# Altium integrated library Integrated_Circuts.IntLib: 31 symbols (part 1 of 2)
Pins are listed as number, name and electrical type; pins without a type are passive.

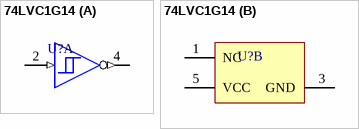
[diagram p0: symbol 74LVC1G14]

## 74LVC1G14
designator U?  (value not drawn)
footprint SOT23-5_L
footprint SOT23-5_M
footprint SOT23-5_N
part A pins: 2 A (in) "Input A", 4 Y (out) "Output Y"
part B pins: 1 NC "Ground", 3 GND (power) "Ground Pin", 5 VCC (power) "Power Pin"


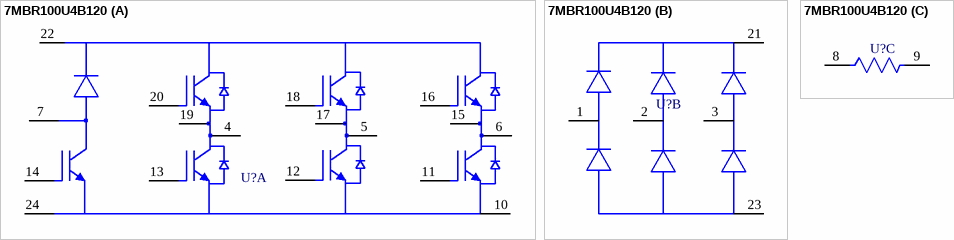
[diagram p1: symbol 7MBR100U4B120]

## 7MBR100U4B120
designator U?  (value not drawn)
footprint 7MBR100U4B120
part A pins: 4 U, 5 V, 6 W, 7 B, 10 En, 11 Gz, 12 Gy, 13 Gx, 14 Gb, 15 Ew, 16 Gw, 17 Ev, 18 Gv, 19 Eu, 20 Gu, 22 P1, 24 N1
part B pins: 1 R, 2 S, 3 T, 21 P, 23 N
part C pins: 8, 9


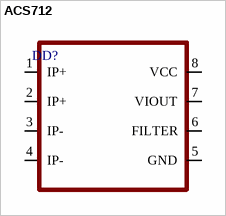
[diagram p2: symbol ACS712]

## ACS712
designator DD?
footprint SO8-150
pins: 1 IP+, 2 IP+, 3 IP-, 4 IP-, 5 GND, 6 FILTER, 7 VIOUT, 8 VCC


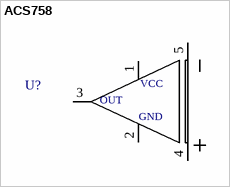
[diagram p3: symbol ACS758]

## ACS758
designator U?  (value not drawn)
footprint ACS758-100
pins: 1 +VCC, 2 GND, 3 OUT, 4 +IP, 5 -IP
text: VCC


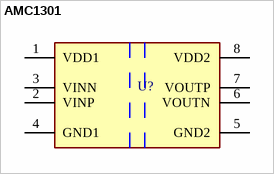
[diagram p4: symbol AMC1301]

## AMC1301
designator U?  (value not drawn)
footprint FP-DWV0008A-IPC_A
footprint FP-DWV0008A-IPC_B
footprint FP-DWV0008A-IPC_C
footprint FP-DWV0008A-MFG
pins: 1 VDD1 (power), 2 VINP (hiz), 3 VINN (hiz), 4 GND1 (power), 5 GND2 (power), 6 VOUTN, 7 VOUTP, 8 VDD2 (power)


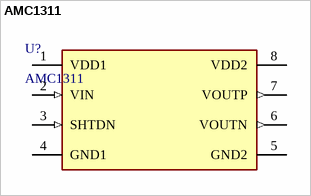
[diagram p5: symbol AMC1311]

## AMC1311
designator U?
footprint FP-DWV0008A-MFG
footprint FP-DWV0008A-IPC_C
footprint FP-DWV0008A-IPC_B
footprint FP-DWV0008A-IPC_A
pins: 1 VDD1 (power), 2 VIN (in), 3 SHTDN (in), 4 GND1 (power), 5 GND2 (power), 6 VOUTN (out), 7 VOUTP (out), 8 VDD2 (power)


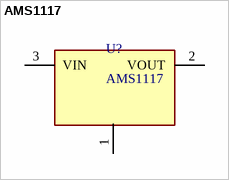
[diagram p6: symbol AMS1117]

## AMS1117
designator U?
footprint SOT-223-3
footprint SOT-223
footprint SOT-89
pins: 1 Ground (power), 2 VOUT, 3 VIN (power)


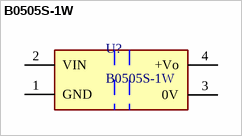
[diagram p7: symbol B0505S-1W]

## B0505S-1W
designator U?
footprint B0505S-1W
pins: 1 GND (power), 2 VIN (power), 3 0V (power), 4 +Vo (power)


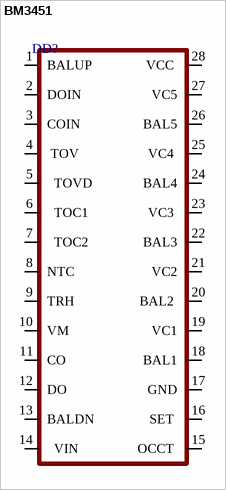
[diagram p8: symbol BM3451]

## BM3451
designator DD?
footprint TSSOP-28
pins: 1 BALUP, 2 DOIN, 3 COIN , 4  TOV, 5   TOVD, 6   TOC1, 7   TOC2, 8 NTC, 9 TRH, 10 VM, 11 CO , 12 DO, 13 BALDN, 14   VIN, 15 OCCT , 16 SET , 17 GND, 18 BAL1, 19 VC1, 20 BAL2 , 21 VC2, 22 BAL3, 23 VC3 , 24 BAL4, 25 VC4 , 26 BAL5, 27 VC5, 28 VCC 


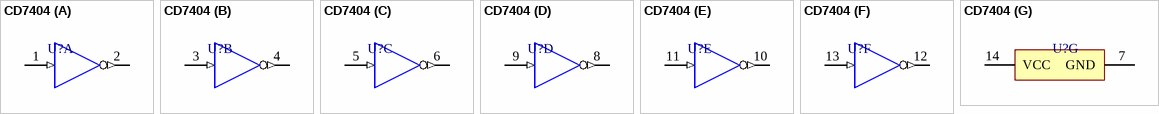
[diagram p9: symbol CD7404]

## CD7404
designator U?  (value not drawn)
footprint D0014A_L
footprint D0014A_N
footprint D0014A_M
part A pins: 1 1A (in) "Input 1A", 2 ~{1Y} (out) "Output 1Y"
part B pins: 3 2A (in) "Input 2A", 4 ~{2Y} (out) "Output 2Y"
part C pins: 5 3A (in) "Input 3A", 6 ~{3Y} (out) "Output 3Y"
part D pins: 8 ~{4Y} (out) "Output 4Y", 9 4A (in) "Input 4A"
part E pins: 10 ~{5Y} (out) "Output 5Y", 11 5A (in) "Input 5A"
part F pins: 12 ~{6Y} (out) "Output 6Y", 13 6A (in) "Input 6A"
part G pins: 7 GND (power) "Ground Pin", 14 VCC (power) "Power Pin"


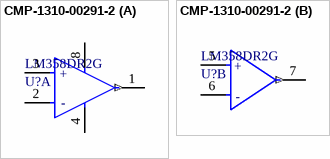
[diagram p10: symbol CMP-1310-00291-2]

## CMP-1310-00291-2
designator U?, comment LM358DR2G
IC OPAMP GP 2 CIRCUIT 8SOIC; Gain Bandwidth Product: 1MHz; Number of Circuits: 2; Min Supply Voltage: 3V; Slew Rate: 0.6V/µs; Max Dual Supply Voltage: 16V; Common Mode Rejection Ratio: 65dB; Input Bias Current: 250nA; Min Dual Supply Voltage: 1.5V; Dual Supply Voltage: 9V; Operating Supply Current: 1.5mA; Output Current: 40mA; Input Offset Voltage (Vos): 7mV; Nominal Supply Current: 1.2mA; Voltage Gain: 100dB; Max Supply Voltage: 32V; Width: 4mm; Number of Pins: 8; Min Operating Temperature: 0°C; REACH SVHC: No SVHC; Contact Plating: Tin; Lead Free: Lead Free; Halogen Free: Halogen Free; Power Supply Rejection Ratio (PSRR): 65dB; Operating Supply Voltage: 16V; Package Quantity: 2500; Max Operating Temperature: 70°C; Case/Package: SOIC; Height: 1.5mm; Packaging: Tape and Reel; Radiation Hardening: No; Number of Channels: 2; Bandwidth: 1MHz; Length: 5mm; Number of Elements: 2; Number of Amplifiers: 2; Output Current per Channel: 40mA
footprint FP-751-07-IPC_B
footprint FP-751-07-IPC_C
footprint FP-751-07-IPC_A
footprint FP-751-07-MFG
part A pins: 1 OUTPUT A (out), 2 INPUT A- (hiz), 3 INPUT A+ (hiz), 4 VEE/GND (power), 8 VCC (power)
part B pins: 5 INPUT B+ (hiz), 6 INPUT B- (hiz), 7 OUTPUT B (out)
part A text: +; -
part B text: +; -


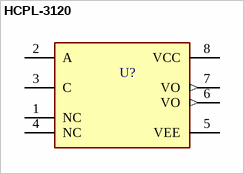
[diagram p11: symbol HCPL-3120]

## HCPL-3120
designator U?  (value not drawn)
footprint HCPL-3120
pins: 1 NC, 2 A, 3 C, 4 NC, 5 VEE (power), 6 VO (out), 7 VO (out), 8 VCC (power)


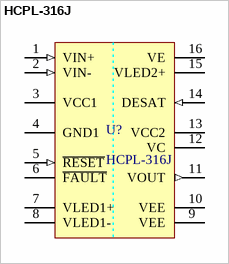
[diagram p12: symbol HCPL-316J]

## HCPL-316J
designator U?
footprint SOIC127P1036X391-16N
pins: 1 VIN+ (in) "Noninverting gate drive voltage output (VOUT) control input.", 2 VIN- (in) "Inverting gate drive voltage output(VOUT) control input.", 3 VCC1 (power) "Positive input supply voltage. (4.5 V to 5.5 V)", 4 GND1 (power) "Input Ground", 5 ~{RESET} (in) "F\A\U\L\T\ reset input.", 6 ~{FAULT} (hiz) "Fault output", 7 VLED1+ "LED 1 anode.", 8 VLED1- "LED 1 cathode.", 9 VEE (power) "Output supply voltage.", 10 VEE (power) "Output supply voltage.", 11 VOUT (out) "Gate drive voltage output.", 12 VC (power) "Collector of output pull-up triple-darlington 0.1 us, asynchronously resets FAULT output high transistor", 13 VCC2 (power) "Positive output supply voltage", 14 DESAT (in) "Desaturation voltage input.", 15 VLED2+ "LED 2 anode.", 16 VE (power) "Common (IGBT emitter) output supply voltage."


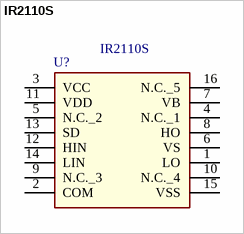
[diagram p13: symbol IR2110S]

## IR2110S
designator U?
IC DRIVER HIGH/LOW SIDE 16-SOIC; Manufacturer_Name: Infineon; Geometry.Height: 2.65mm; Manufacturer_Part_Number: IR2110S; Mouser Part Number: *; Mouser Price/Stock: *; Arrow Part Number: *; Arrow Price/Stock: *; Datasheet Link: https://www.infineon.com/dgdl/ir2110.pdf?fileId=5546d462533600a4015355c80333167e
footprint SOIC127P1036X391-16N
pins: 1 LO, 2 COM, 3 VCC, 4 N.C._1, 5 N.C._2, 6 VS, 7 VB, 8 HO, 9 N.C._3, 10 N.C._4, 11 VDD, 12 HIN, 13 SD, 14 LIN, 15 VSS, 16 N.C._5


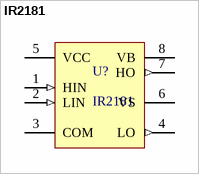
[diagram p14: symbol IR2181]

## IR2181
designator U?
IR2181 Driver
footprint SO8-150
footprint SOIC-8
pins: 1 HIN (in), 2 LIN (in), 3 COM, 4 LO (out), 5 VCC (power), 6 VS (power), 7 HO (out), 8 VB (power)


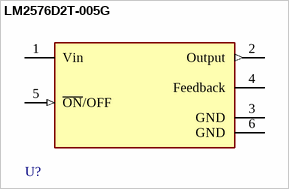
[diagram p15: symbol LM2576D2T-005G]

## LM2576D2T-005G
designator U?  (value not drawn)
footprint ON_Semiconductor_936A-02_MFG
pins: 1 Vin (power), 2 Output (out), 3 GND (power), 4 Feedback, 5 ~{ON}/OFF (in), 6 GND (power)


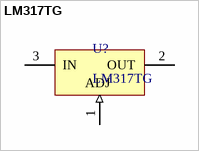
[diagram p16: symbol LM317TG]

## LM317TG
designator U?
footprint TO-220_Bended_Rad
pins: 1 ADJ (in), 2 OUT (power), 3 IN (power)


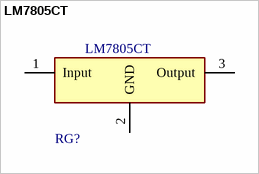
[diagram p17: symbol LM7805CT]

## LM7805CT
designator RG?  Part Number: LM7805CT
REG IC REG LINEAR 5V 1A TO220AB; Manufacturer: Fairchild; Voltage Dropout (Max): 2V @ 1A (Typ); Voltage - Input (Max): 35V; helpURL: https://upverter.com/upn/revision/b27a7358b7dd93a3/; ComponentLink2Description: Datasheet; Temperature: -40°C to +125°C; Package: TO220; Supplier 2: Mouser; Price: 0.384521982769; Supplier 1: Digi-Key; ComponentLink1URL: https://upverter.com/upn/revision/b27a7358b7dd93a3/; Supplier Part Number 2: 512-LM7805CT; Supplier Part Number 1: LM7805CT-ND; ComponentLink1Description: Upverter; ComponentLink2URL: https://www.fairchildsemi.com/datasheets/LM/LM7805.pdf; RoHS: TRUE; Mouser Part Number: 512-LM7805CT; Ipc Land Pattern Name: TO-220; Temperature Range High: +125°C; Digikey Description: REG IC REG LINEAR 5V 1A TO220AB; Digikey Part Number: LM7805CT-ND; Lead Free: yes; Temperature Range Low: -40°C; Voltage - Output: 5V; Current-Output: 1A
footprint Fairchild_LM7805CT_0
footprint TO-220_Bended_Rad
footprint TO-220(bend2)
footprint SOT-223-3
footprint TO-252
pins: 1 Input (power), 2 GND (power), 3 Output


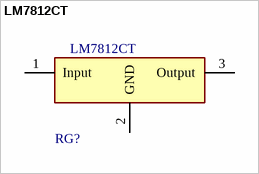
[diagram p18: symbol LM7812CT]

## LM7812CT
designator RG?  Part Number: LM7812CT
REG IC REG LINEAR 12V 1A TO220AB; Manufacturer: Fairchild; Voltage Dropout (Max): 2V @ 1A (Typ); Voltage - Input (Max): 35V; Voltage - Output: 5V; helpURL: https://upverter.com/upn/revision/b27a7358b7dd93a3/; ComponentLink2Description: Datasheet; Temperature: -40°C to +125°C; Package: TO220; Supplier 2: Mouser; Price: 0.384521982769; Supplier 1: Digi-Key; ComponentLink1URL: https://upverter.com/upn/revision/b27a7358b7dd93a3/; Supplier Part Number 2: 512-LM7805CT; Supplier Part Number 1: LM7805CT-ND; ComponentLink1Description: Upverter; ComponentLink2URL: https://www.fairchildsemi.com/datasheets/LM/LM7805.pdf; RoHS: TRUE; Mouser Part Number: 512-LM7805CT; Ipc Land Pattern Name: TO-220; Temperature Range High: +125°C; Digikey Description: REG IC REG LINEAR 5V 1A TO220AB; Digikey Part Number: LM7805CT-ND; Lead Free: yes; Temperature Range Low: -40°C; Current-Output: 1A
footprint Fairchild_LM7805CT_0
footprint TO-220_Bended_Rad
footprint TO-220_lay
footprint TO-220(bend2)
pins: 1 Input (power), 2 GND (power), 3 Output


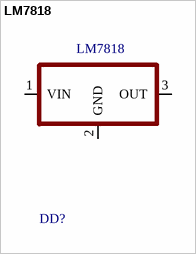
[diagram p19: symbol LM7818]

## LM7818
designator DD?
footprint TO-252
pins: 1 VIN, 2 GND, 3 OUT


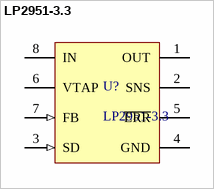
[diagram p20: symbol LP2951-3.3]

## LP2951-3.3
designator U?
footprint SOIC-8_L
footprint SOIC-8_M
footprint SOIC-8_N
footprint SOIC-8
pins: 1 OUT (power), 2 SNS, 3 SD (in), 4 GND (power), 5 ~{ERR} (oc), 6 VTAP, 7 FB (in), 8 IN (power)


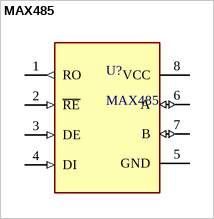
[diagram p21: symbol MAX485]

## MAX485
designator U?
footprint SOIC-8-MFG
footprint SOIC-8-A
footprint SOIC-8-B
footprint SOIC-8-C
pins: 1 RO (out), 2 ~{RE} (in), 3 DE (in), 4 DI (in), 5 GND (power), 6 A (io), 7 B (io), 8 VCC (power)


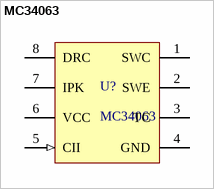
[diagram p22: symbol MC34063]

## MC34063
designator U?
footprint SO8-150
footprint SOIC-8_M
footprint SOIC-8-B
pins: 1 SWC (oc), 2 SWE (oe), 3 TC, 4 GND (power), 5 CII (in), 6 VCC (power), 7 IPK, 8 DRC (oc)
